# Altium schematic symbol library TXU0202DCUR.SchLib: 1 symbol
Pins are listed as number, name and electrical type; pins without a type are passive.

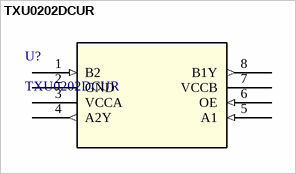
[diagram p0: symbol TXU0202DCUR]

## TXU0202DCUR
designator U?
Two channel fixed-direction level shifter with channels in opposite direction 8-VSSOP -40 to 125; Manufacturer_Name: Texas Instruments; Copyright: Copyright (C) 2026 Ultra Librarian. All rights reserved.; Manufacturer_Part_Number: TXU0202DCUR; RefDes: RefDes; Type: Type
footprint SO8_DCU_TEX
pins: 1 B2 (in), 2 GND (power), 3 VCCA (power), 4 A2Y (out), 5 A1 (in), 6 OE (in), 7 VCCB (power), 8 B1Y (out)